# Altium footprint library WR-PHD_Socket Header_2.54mm.PcbLib: 187 footprints (part 7 of 12)
Each footprint in its own frame and in the unit in brackets; x right, y up, seen from the top. Pads: shape width x height; smd on the part's side, far side on the other; paste and mask are expansions set on the pad; w line width, h text height; cw(c..) or ccw(c..) is an arc to the next point about the centre after c.
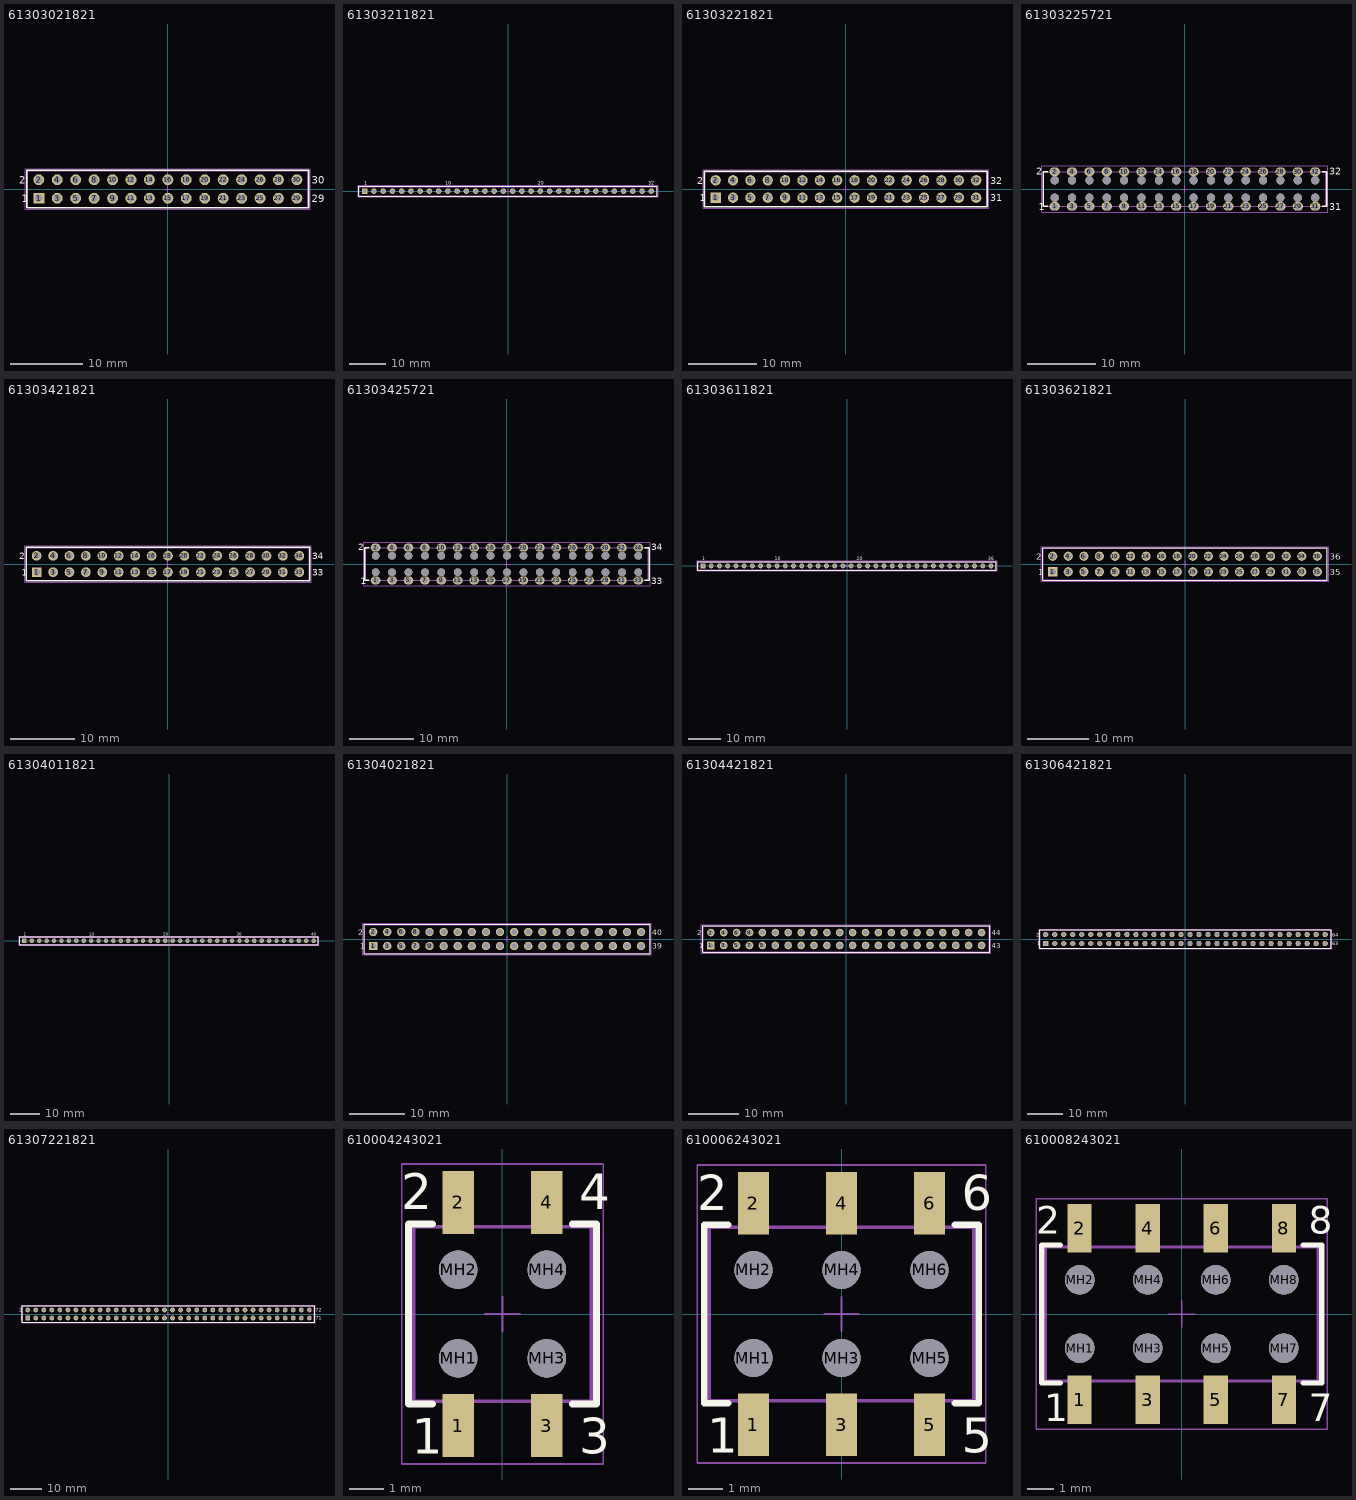
[diagram p6: the footprints below, top view; thin cyan lines are the x and y axes]

## 61303021821 [mm] "Socket Header, Pitch 2.54 mm, THT, Vertical, dual row, 30p"
height 8.4
pads (30):
  rect 1.5x1.5 hole 1.02: 1(-17.78,-1.27)
  round 1.5 hole 1.02: 2(-17.78,1.27) 3(-15.24,-1.27) 4(-15.24,1.27) 5(-12.7,-1.27) 6(-12.7,1.27) 7(-10.16,-1.27) 8(-10.16,1.27) 9(-7.62,-1.27) 10(-7.62,1.27) 11(-5.08,-1.27) 12(-5.08,1.27) 13(-2.54,-1.27) 14(-2.54,1.27) 15(0,-1.27) 16(0,1.27) 17(2.54,-1.27) 18(2.54,1.27) 19(5.08,-1.27) 20(5.08,1.27) 21(7.62,-1.27) 22(7.62,1.27) 23(10.16,-1.27) 24(10.16,1.27) 25(12.7,-1.27) 26(12.7,1.27) 27(15.24,-1.27) 28(15.24,1.27) 29(17.78,-1.27) 30(17.78,1.27)
Top Overlay:
  lines w0.2: -19.425,-2.615 -19.425,2.615 19.425,2.615 19.425,-2.615 -19.425,-2.615
  text "2" at -20.51,0.7 h1.02
  text "1" at -20.11,-1.8 h1.02
  text "30" at 19.81,0.7 h1.02
  text "29" at 19.81,-1.8 h1.02
Mechanical 13:
  lines w0.1: -19.3,-2.54 19.3,-2.54 19.3,2.54 -19.3,2.54 -19.3,-2.54
Mechanical 15:
  lines w0.05: -0.5,0 0.5,0 ; 0,-0.5 0,0.5 ; -19.625,-2.815 19.625,-2.815 19.625,2.815 -19.625,2.815 -19.625,-2.815
3D body "61303021821.stp": height 8.45, standoff -3.05, extent -19.3,-2.54 19.3,2.54

## 61303211821 [mm] "Socket Header, Pitch 2.54 mm, THT, Vertical, single row, 32p"
height 8.5
pads (32):
  rect 1.52x1.52 hole 1.02: 1(-39.37,0)
  round 1.52 hole 1.02: 2(-36.83,0) 3(-34.29,0) 4(-31.75,0) 5(-29.21,0) 6(-26.67,0) 7(-24.13,0) 8(-21.59,0) 9(-19.05,0) 10(-16.51,0) 11(-13.97,0) 12(-11.43,0) 13(-8.89,0) 14(-6.35,0) 15(-3.81,0) 16(-1.27,0) 17(1.27,0) 18(3.81,0) 19(6.35,0) 20(8.89,0) 21(11.43,0) 22(13.97,0) 23(16.51,0) 24(19.05,0) 25(21.59,0) 26(24.13,0) 27(26.67,0) 28(29.21,0) 29(31.75,0) 30(34.29,0) 31(36.83,0) 32(39.37,0)
Top Overlay:
  lines w0.2: -41.015,-1.35 41.015,-1.35 41.015,1.35 -41.015,1.35 -41.015,-1.35
  text "32" at 38.5,1.7 h1.02
  text "1" at -39.56,1.7 h1.02
  text "10" at -17.19,1.7 h1.02
  text "20" at 8.16,1.7 h1.02
Mechanical 13:
  lines w0.1: -40.89,-1.25 40.89,-1.25 40.89,1.25 -40.89,1.25 -40.89,-1.25
Mechanical 15:
  lines w0.05: -0.5,0 0.5,0 ; 0,-0.5 0,0.5 ; -41.215,-1.55 41.215,-1.55 41.215,1.55 -41.215,1.55 -41.215,-1.55
3D body "61303211821.stp": height 8.55, standoff -3.06, extent -40.89,-1.25 40.89,1.25

## 61303221821 [mm] "Socket Header, Pitch 2.54 mm, THT, Vertical, dual row, 32p"
height 8.4
pads (32):
  rect 1.5x1.5 hole 1.02: 1(-19.05,-1.27)
  round 1.5 hole 1.02: 2(-19.05,1.27) 3(-16.51,-1.27) 4(-16.51,1.27) 5(-13.97,-1.27) 6(-13.97,1.27) 7(-11.43,-1.27) 8(-11.43,1.27) 9(-8.89,-1.27) 10(-8.89,1.27) 11(-6.35,-1.27) 12(-6.35,1.27) 13(-3.81,-1.27) 14(-3.81,1.27) 15(-1.27,-1.27) 16(-1.27,1.27) 17(1.27,-1.27) 18(1.27,1.27) 19(3.81,-1.27) 20(3.81,1.27) 21(6.35,-1.27) 22(6.35,1.27) 23(8.89,-1.27) 24(8.89,1.27) 25(11.43,-1.27) 26(11.43,1.27) 27(13.97,-1.27) 28(13.97,1.27) 29(16.51,-1.27) 30(16.51,1.27) 31(19.05,-1.27) 32(19.05,1.27)
Top Overlay:
  lines w0.2: -20.695,-2.615 -20.695,2.615 20.695,2.615 20.695,-2.615 -20.695,-2.615
  text "31" at 21.08,-1.8 h1.02
  text "32" at 21.08,0.7 h1.02
  text "2" at -21.78,0.7 h1.02
  text "1" at -21.38,-1.8 h1.02
Mechanical 13:
  lines w0.1: -20.57,-2.54 20.57,-2.54 20.57,2.54 -20.57,2.54 -20.57,-2.54
Mechanical 15:
  lines w0.05: -0.5,0 0.5,0 ; 0,-0.5 0,0.5 ; -20.895,-2.815 20.895,-2.815 20.895,2.815 -20.895,2.815 -20.895,-2.815
3D body "61303221821.stp": height 8.45, standoff -3.05, extent -20.57,-2.54 20.57,2.54

## 61303225721 [mm] "Dual Socket Header Bottom Entry, pitch 2.54mm, 32p"
height 5
pads (64):
  oval 1.5x1.25 hole 1: 1(-19.05,-2.54) 2(-19.05,2.54) 3(-16.51,-2.54) 4(-16.51,2.54) 5(-13.97,-2.54) 6(-13.97,2.54) 7(-11.43,-2.54) 8(-11.43,2.54) 9(-8.89,-2.54) 10(-8.89,2.54) 11(-6.35,-2.54) 12(-6.35,2.54) 13(-3.81,-2.54) 14(-3.81,2.54) 15(-1.27,-2.54) 16(-1.27,2.54) 17(1.27,-2.54) 18(1.27,2.54) 19(3.81,-2.54) 20(3.81,2.54) 21(6.35,-2.54) 22(6.35,2.54) 23(8.89,-2.54) 24(8.89,2.54) 25(11.43,-2.54) 26(11.43,2.54) 27(13.97,-2.54) 28(13.97,2.54) 29(16.51,-2.54) 30(16.51,2.54) 31(19.05,-2.54) 32(19.05,2.54)
  round 1.2 hole 1.2 unplated: MH1(-19.05,-1.27) MH2(-19.05,1.27) MH3(-16.51,-1.27) MH4(-16.51,1.27) MH5(-13.97,-1.27) MH6(-13.97,1.27) MH7(-11.43,-1.27) MH8(-11.43,1.27) MH9(-8.89,-1.27) MH10(-8.89,1.27) MH11(-6.35,-1.27) MH12(-6.35,1.27) MH13(-3.81,-1.27) MH14(-3.81,1.27) MH15(-1.27,-1.27) MH16(-1.27,1.27) MH17(1.27,-1.27) MH18(1.27,1.27) MH19(3.81,-1.27) MH20(3.81,1.27) MH21(6.35,-1.27) MH22(6.35,1.27) MH23(8.89,-1.27) MH24(8.89,1.27) MH25(11.43,-1.27) MH26(11.43,1.27) MH27(13.97,-1.27) MH28(13.97,1.27) MH29(16.51,-1.27) MH30(16.51,1.27) MH31(19.05,-1.27) MH32(19.05,1.27)
Top Overlay:
  lines w0.2: -20.08,-2.54 -20.72,-2.54 -20.72,2.54 -20.08,2.54 ; 20.08,-2.54 20.72,-2.54 20.72,2.54 20.08,2.54
  text "1" at -21.38,-3.1 h1.02
  text "2" at -21.78,2.1 h1.02
  text "31" at 21.08,-3.1 h1.02
  text "32" at 21.08,2.1 h1.02
Mechanical 13:
  lines w0.1: -20.62,-2.54 -20.62,2.54 20.62,2.54 20.62,-2.54 -20.62,-2.54
Mechanical 15:
  lines w0.05: -0.5,0 0.5,0 ; 0,-0.5 0,0.5 ; -20.92,-3.365 20.92,-3.365 20.92,3.365 -20.92,3.365 -20.92,-3.365
3D body "61303225721.stp": height 5.05, standoff -3.05, extent -20.62,-2.665 20.62,2.665

## 61303421821 [mm] "Socket Header, Pitch 2.54 mm, THT, Vertical, dual row, 34p"
height 8.4
pads (34):
  rect 1.5x1.5 hole 1.02: 1(-20.32,-1.27)
  round 1.5 hole 1.02: 2(-20.32,1.27) 3(-17.78,-1.27) 4(-17.78,1.27) 5(-15.24,-1.27) 6(-15.24,1.27) 7(-12.7,-1.27) 8(-12.7,1.27) 9(-10.16,-1.27) 10(-10.16,1.27) 11(-7.62,-1.27) 12(-7.62,1.27) 13(-5.08,-1.27) 14(-5.08,1.27) 15(-2.54,-1.27) 16(-2.54,1.27) 17(0,-1.27) 18(0,1.27) 19(2.54,-1.27) 20(2.54,1.27) 21(5.08,-1.27) 22(5.08,1.27) 23(7.62,-1.27) 24(7.62,1.27) 25(10.16,-1.27) 26(10.16,1.27) 27(12.7,-1.27) 28(12.7,1.27) 29(15.24,-1.27) 30(15.24,1.27) 31(17.78,-1.27) 32(17.78,1.27) 33(20.32,-1.27) 34(20.32,1.27)
Top Overlay:
  lines w0.2: -21.965,-2.615 21.965,-2.615 21.965,2.615 -21.965,2.615 -21.965,-2.615
  text "1" at -22.65,-1.8 h1.02
  text "2" at -23.05,0.7 h1.02
  text "34" at 22.35,0.7 h1.02
  text "33" at 22.35,-1.8 h1.02
Mechanical 13:
  lines w0.1: -21.84,-2.54 -21.84,2.54 21.84,2.54 21.84,-2.54 -21.84,-2.54
Mechanical 15:
  lines w0.05: -0.5,0 0.5,0 ; 0,-0.5 0,0.5 ; -22.165,-2.815 -22.165,2.815 22.165,2.815 22.165,-2.815 -22.165,-2.815
3D body "61303421821.stp": height 8.45, standoff -3.05, extent -21.84,-2.54 21.84,2.54

## 61303425721 [mm] "Dual Socket Header Bottom Entry, pitch 2.54mm, 34p"
height 5
pads (68):
  oval 1.5x1.25 hole 1: 1(-20.32,-2.54) 2(-20.32,2.54) 3(-17.78,-2.54) 4(-17.78,2.54) 5(-15.24,-2.54) 6(-15.24,2.54) 7(-12.7,-2.54) 8(-12.7,2.54) 9(-10.16,-2.54) 10(-10.16,2.54) 11(-7.62,-2.54) 12(-7.62,2.54) 13(-5.08,-2.54) 14(-5.08,2.54) 15(-2.54,-2.54) 16(-2.54,2.54) 17(0,-2.54) 18(0,2.54) 19(2.54,-2.54) 20(2.54,2.54) 21(5.08,-2.54) 22(5.08,2.54) 23(7.62,-2.54) 24(7.62,2.54) 25(10.16,-2.54) 26(10.16,2.54) 27(12.7,-2.54) 28(12.7,2.54) 29(15.24,-2.54) 30(15.24,2.54) 31(17.78,-2.54) 32(17.78,2.54) 33(20.32,-2.54) 34(20.32,2.54)
  round 1.2 hole 1.2 unplated: MH1(-20.32,-1.27) MH2(-20.32,1.27) MH3(-17.78,-1.27) MH4(-17.78,1.27) MH5(-15.24,-1.27) MH6(-15.24,1.27) MH7(-12.7,-1.27) MH8(-12.7,1.27) MH9(-10.16,-1.27) MH10(-10.16,1.27) MH11(-7.62,-1.27) MH12(-7.62,1.27) MH13(-5.08,-1.27) MH14(-5.08,1.27) MH15(-2.54,-1.27) MH16(-2.54,1.27) MH17(0,-1.27) MH18(0,1.27) MH19(2.54,-1.27) MH20(2.54,1.27) MH21(5.08,-1.27) MH22(5.08,1.27) MH23(7.62,-1.27) MH24(7.62,1.27) MH25(10.16,-1.27) MH26(10.16,1.27) MH27(12.7,-1.27) MH28(12.7,1.27) MH29(15.24,-1.27) MH30(15.24,1.27) MH31(17.78,-1.27) MH32(17.78,1.27) MH33(20.32,-1.27) MH34(20.32,1.27)
Top Overlay:
  lines w0.2: -21.35,-2.54 -21.99,-2.54 -21.99,2.54 -21.35,2.54 ; 21.35,-2.54 21.99,-2.54 21.99,2.54 21.35,2.54
  text "34" at 22.35,2.1 h1.02
  text "33" at 22.35,-3.1 h1.02
  text "2" at -23.05,2.1 h1.02
  text "1" at -22.65,-3.1 h1.02
Mechanical 13:
  lines w0.1: -21.89,-2.54 21.89,-2.54 21.89,2.54 -21.89,2.54 -21.89,-2.54
Mechanical 15:
  lines w0.05: -0.5,0 0.5,0 ; 0,-0.5 0,0.5 ; -22.19,-3.365 -22.19,3.365 22.19,3.365 22.19,-3.365 -22.19,-3.365
3D body "61303425721.stp": height 5.05, standoff -3.05, extent -21.89,-2.665 21.89,2.665

## 61303611821 [mm] "Socket Header, Pitch 2.54 mm, THT, Vertical, single row, 36p"
height 8.5
pads (36):
  rect 1.52x1.52 hole 1.02: 1(-44.45,0)
  round 1.52 hole 1.02: 2(-41.91,0) 3(-39.37,0) 4(-36.83,0) 5(-34.29,0) 6(-31.75,0) 7(-29.21,0) 8(-26.67,0) 9(-24.13,0) 10(-21.59,0) 11(-19.05,0) 12(-16.51,0) 13(-13.97,0) 14(-11.43,0) 15(-8.89,0) 16(-6.35,0) 17(-3.81,0) 18(-1.27,0) 19(1.27,0) 20(3.81,0) 21(6.35,0) 22(8.89,0) 23(11.43,0) 24(13.97,0) 25(16.51,0) 26(19.05,0) 27(21.59,0) 28(24.13,0) 29(26.67,0) 30(29.21,0) 31(31.75,0) 32(34.29,0) 33(36.83,0) 34(39.37,0) 35(41.91,0) 36(44.45,0)
Top Overlay:
  lines w0.2: -46.095,-1.35 -46.095,1.35 46.095,1.35 46.095,-1.35 -46.095,-1.35
  text "20" at 3.08,1.7 h1.02
  text "10" at -22.27,1.7 h1.02
  text "1" at -44.64,1.7 h1.02
  text "36" at 43.58,1.7 h1.02
Mechanical 13:
  lines w0.1: -45.97,-1.25 -45.97,1.25 45.97,1.25 45.97,-1.25 -45.97,-1.25
Mechanical 15:
  lines w0.05: -0.5,0 0.5,0 ; 0,-0.5 0,0.5 ; -46.295,-1.55 -46.295,1.55 46.295,1.55 46.295,-1.55 -46.295,-1.55
3D body "61303611821.stp": height 8.55, standoff -3.06, extent -45.97,-1.25 45.97,1.25

## 61303621821 [mm] "Socket Header, Pitch 2.54 mm, THT, Vertical, dual row, 36p"
height 8.4
pads (36):
  rect 1.5x1.5 hole 1.02: 1(-21.59,-1.27)
  round 1.5 hole 1.02: 2(-21.59,1.27) 3(-19.05,-1.27) 4(-19.05,1.27) 5(-16.51,-1.27) 6(-16.51,1.27) 7(-13.97,-1.27) 8(-13.97,1.27) 9(-11.43,-1.27) 10(-11.43,1.27) 11(-8.89,-1.27) 12(-8.89,1.27) 13(-6.35,-1.27) 14(-6.35,1.27) 15(-3.81,-1.27) 16(-3.81,1.27) 17(-1.27,-1.27) 18(-1.27,1.27) 19(1.27,-1.27) 20(1.27,1.27) 21(3.81,-1.27) 22(3.81,1.27) 23(6.35,-1.27) 24(6.35,1.27) 25(8.89,-1.27) 26(8.89,1.27) 27(11.43,-1.27) 28(11.43,1.27) 29(13.97,-1.27) 30(13.97,1.27) 31(16.51,-1.27) 32(16.51,1.27) 33(19.05,-1.27) 34(19.05,1.27) 35(21.59,-1.27) 36(21.59,1.27)
Top Overlay:
  lines w0.2: -23.235,-2.615 23.235,-2.615 23.235,2.615 -23.235,2.615 -23.235,-2.615
  text "35" at 23.62,-1.8 h1.02
  text "36" at 23.62,0.7 h1.02
  text "1" at -23.92,-1.8 h1.02
  text "2" at -24.32,0.7 h1.02
Mechanical 13:
  lines w0.1: -23.11,-2.54 -23.11,2.54 23.11,2.54 23.11,-2.54 -23.11,-2.54
Mechanical 15:
  lines w0.05: -0.5,0 0.5,0 ; 0,-0.5 0,0.5 ; -23.435,-2.815 -23.435,2.815 23.435,2.815 23.435,-2.815 -23.435,-2.815
3D body "61303621821.stp": height 8.45, standoff -3.05, extent -23.11,-2.54 23.11,2.54

## 61304011821 [mm] "Socket Header, Pitch 2.54 mm, THT, Vertical, single row, 40p"
height 8.5
pads (40):
  rect 1.52x1.52 hole 1.02: 1(-49.53,0)
  round 1.52 hole 1.02: 2(-46.99,0) 3(-44.45,0) 4(-41.91,0) 5(-39.37,0) 6(-36.83,0) 7(-34.29,0) 8(-31.75,0) 9(-29.21,0) 10(-26.67,0) 11(-24.13,0) 12(-21.59,0) 13(-19.05,0) 14(-16.51,0) 15(-13.97,0) 16(-11.43,0) 17(-8.89,0) 18(-6.35,0) 19(-3.81,0) 20(-1.27,0) 21(1.27,0) 22(3.81,0) 23(6.35,0) 24(8.89,0) 25(11.43,0) 26(13.97,0) 27(16.51,0) 28(19.05,0) 29(21.59,0) 30(24.13,0) 31(26.67,0) 32(29.21,0) 33(31.75,0) 34(34.29,0) 35(36.83,0) 36(39.37,0) 37(41.91,0) 38(44.45,0) 39(46.99,0) 40(49.53,0)
Top Overlay:
  lines w0.2: -51.175,-1.35 51.175,-1.35 51.175,1.35 -51.175,1.35 -51.175,-1.35
  text "1" at -49.72,1.7 h1.02
  text "10" at -27.35,1.7 h1.02
  text "20" at -2,1.7 h1.02
  text "40" at 48.66,1.7 h1.02
  text "30" at 23.26,1.7 h1.02
Mechanical 13:
  lines w0.1: -51.05,-1.25 51.05,-1.25 51.05,1.25 -51.05,1.25 -51.05,-1.25
Mechanical 15:
  lines w0.05: -0.5,0 0.5,0 ; 0,-0.5 0,0.5 ; -51.375,-1.55 51.375,-1.55 51.375,1.55 -51.375,1.55 -51.375,-1.55
3D body "61304011821.stp": height 8.55, standoff -3.05, extent -51.05,-1.25 51.05,1.25

## 61304021821 [mm] "Socket Header, Pitch 2.54 mm, THT, Vertical, dual row, 40p"
height 8.4
pads (40):
  rect 1.5x1.5 hole 1.02: 1(-24.13,-1.27)
  round 1.5 hole 1.02: 2(-24.13,1.27) 3(-21.59,-1.27) 4(-21.59,1.27) 5(-19.05,-1.27) 6(-19.05,1.27) 7(-16.51,-1.27) 8(-16.51,1.27) 9(-13.97,-1.27) 10(-13.97,1.27) 11(-11.43,-1.27) 12(-11.43,1.27) 13(-8.89,-1.27) 14(-8.89,1.27) 15(-6.35,-1.27) 16(-6.35,1.27) 17(-3.81,-1.27) 18(-3.81,1.27) 19(-1.27,-1.27) 20(-1.27,1.27) 21(1.27,-1.27) 22(1.27,1.27) 23(3.81,-1.27) 24(3.81,1.27) 25(6.35,-1.27) 26(6.35,1.27) 27(8.89,-1.27) 28(8.89,1.27) 29(11.43,-1.27) 30(11.43,1.27) 31(13.97,-1.27) 32(13.97,1.27) 33(16.51,-1.27) 34(16.51,1.27) 35(19.05,-1.27) 36(19.05,1.27) 37(21.59,-1.27) 38(21.59,1.27) 39(24.13,-1.27) 40(24.13,1.27)
Top Overlay:
  lines w0.2: -25.775,-2.615 25.775,-2.615 25.775,2.615 -25.775,2.615 -25.775,-2.615
  text "1" at -26.46,-1.8 h1.02
  text "2" at -26.86,0.7 h1.02
  text "40" at 26.16,0.7 h1.02
  text "39" at 26.16,-1.8 h1.02
Mechanical 13:
  lines w0.1: -25.65,-2.54 -25.65,2.54 25.65,2.54 25.65,-2.54 -25.65,-2.54
Mechanical 15:
  lines w0.05: -0.5,0 0.5,0 ; 0,-0.5 0,0.5 ; -25.975,-2.815 -25.975,2.815 25.975,2.815 25.975,-2.815 -25.975,-2.815
3D body "61304021821.stp": height 8.45, standoff -3.05, extent -25.65,-2.54 25.65,2.54

## 61304421821 [mm] "Socket Header, Pitch 2.54 mm, THT, Vertical, dual row, 44p"
height 8.4
pads (44):
  rect 1.5x1.5 hole 1.02: 1(-26.67,-1.27)
  round 1.5 hole 1.02: 2(-26.67,1.27) 3(-24.13,-1.27) 4(-24.13,1.27) 5(-21.59,-1.27) 6(-21.59,1.27) 7(-19.05,-1.27) 8(-19.05,1.27) 9(-16.51,-1.27) 10(-16.51,1.27) 11(-13.97,-1.27) 12(-13.97,1.27) 13(-11.43,-1.27) 14(-11.43,1.27) 15(-8.89,-1.27) 16(-8.89,1.27) 17(-6.35,-1.27) 18(-6.35,1.27) 19(-3.81,-1.27) 20(-3.81,1.27) 21(-1.27,-1.27) 22(-1.27,1.27) 23(1.27,-1.27) 24(1.27,1.27) 25(3.81,-1.27) 26(3.81,1.27) 27(6.35,-1.27) 28(6.35,1.27) 29(8.89,-1.27) 30(8.89,1.27) 31(11.43,-1.27) 32(11.43,1.27) 33(13.97,-1.27) 34(13.97,1.27) 35(16.51,-1.27) 36(16.51,1.27) 37(19.05,-1.27) 38(19.05,1.27) 39(21.59,-1.27) 40(21.59,1.27) 41(24.13,-1.27) 42(24.13,1.27) 43(26.67,-1.27) 44(26.67,1.27)
Top Overlay:
  lines w0.2: -28.315,-2.615 28.315,-2.615 28.315,2.615 -28.315,2.615 -28.315,-2.615
  text "1" at -29,-1.8 h1.02
  text "2" at -29.4,0.7 h1.02
  text "44" at 28.7,0.7 h1.02
  text "43" at 28.7,-1.8 h1.02
Mechanical 13:
  lines w0.1: -28.19,-2.54 -28.19,2.54 28.19,2.54 28.19,-2.54 -28.19,-2.54
Mechanical 15:
  lines w0.05: -0.5,0 0.5,0 ; 0,-0.5 0,0.5 ; -28.515,-2.815 -28.515,2.815 28.515,2.815 28.515,-2.815 -28.515,-2.815
3D body "61304421821.stp": height 8.45, standoff -3.05, extent -28.19,-2.54 28.19,2.54

## 61306421821 [mm] "Socket Header, Pitch 2.54 mm, THT, Vertical, dual row, 64p"
height 8.4
pads (64):
  rect 1.5x1.5 hole 1.02: 1(-39.37,-1.27)
  round 1.5 hole 1.02: 2(-39.37,1.27) 3(-36.83,-1.27) 4(-36.83,1.27) 5(-34.29,-1.27) 6(-34.29,1.27) 7(-31.75,-1.27) 8(-31.75,1.27) 9(-29.21,-1.27) 10(-29.21,1.27) 11(-26.67,-1.27) 12(-26.67,1.27) 13(-24.13,-1.27) 14(-24.13,1.27) 15(-21.59,-1.27) 16(-21.59,1.27) 17(-19.05,-1.27) 18(-19.05,1.27) 19(-16.51,-1.27) 20(-16.51,1.27) 21(-13.97,-1.27) 22(-13.97,1.27) 23(-11.43,-1.27) 24(-11.43,1.27) 25(-8.89,-1.27) 26(-8.89,1.27) 27(-6.35,-1.27) 28(-6.35,1.27) 29(-3.81,-1.27) 30(-3.81,1.27) 31(-1.27,-1.27) 32(-1.27,1.27) 33(1.27,-1.27) 34(1.27,1.27) 35(3.81,-1.27) 36(3.81,1.27) 37(6.35,-1.27) 38(6.35,1.27) 39(8.89,-1.27) 40(8.89,1.27) 41(11.43,-1.27) 42(11.43,1.27) 43(13.97,-1.27) 44(13.97,1.27) 45(16.51,-1.27) 46(16.51,1.27) 47(19.05,-1.27) 48(19.05,1.27) 49(21.59,-1.27) 50(21.59,1.27) 51(24.13,-1.27) 52(24.13,1.27) 53(26.67,-1.27) 54(26.67,1.27) 55(29.21,-1.27) 56(29.21,1.27) 57(31.75,-1.27) 58(31.75,1.27) 59(34.29,-1.27) 60(34.29,1.27) 61(36.83,-1.27) 62(36.83,1.27) 63(39.37,-1.27) 64(39.37,1.27)
Top Overlay:
  lines w0.2: -41.015,-2.615 41.015,-2.615 41.015,2.615 -41.015,2.615 -41.015,-2.615
  text "1" at -41.7,-1.8 h1.02
  text "2" at -42.1,0.7 h1.02
  text "64" at 41.4,0.7 h1.02
  text "63" at 41.4,-1.8 h1.02
Mechanical 13:
  lines w0.1: -40.89,-2.54 -40.89,2.54 40.89,2.54 40.89,-2.54 -40.89,-2.54
Mechanical 15:
  lines w0.05: -0.5,0 0.5,0 ; 0,-0.5 0,0.5 ; -41.215,-2.815 -41.215,2.815 41.215,2.815 41.215,-2.815 -41.215,-2.815
3D body "61306421821.stp": height 8.45, standoff -3.05, extent -40.89,-2.54 40.89,2.54

## 61307221821 [mm] "Socket Header, Pitch 2.54 mm, THT, Vertical, dual row, 72p"
height 8.4
pads (72):
  rect 1.5x1.5 hole 1.02: 1(-44.45,-1.27)
  round 1.5 hole 1.02: 2(-44.45,1.27) 3(-41.91,-1.27) 4(-41.91,1.27) 5(-39.37,-1.27) 6(-39.37,1.27) 7(-36.83,-1.27) 8(-36.83,1.27) 9(-34.29,-1.27) 10(-34.29,1.27) 11(-31.75,-1.27) 12(-31.75,1.27) 13(-29.21,-1.27) 14(-29.21,1.27) 15(-26.67,-1.27) 16(-26.67,1.27) 17(-24.13,-1.27) 18(-24.13,1.27) 19(-21.59,-1.27) 20(-21.59,1.27) 21(-19.05,-1.27) 22(-19.05,1.27) 23(-16.51,-1.27) 24(-16.51,1.27) 25(-13.97,-1.27) 26(-13.97,1.27) 27(-11.43,-1.27) 28(-11.43,1.27) 29(-8.89,-1.27) 30(-8.89,1.27) 31(-6.35,-1.27) 32(-6.35,1.27) 33(-3.81,-1.27) 34(-3.81,1.27) 35(-1.27,-1.27) 36(-1.27,1.27) 37(1.27,-1.27) 38(1.27,1.27) 39(3.81,-1.27) 40(3.81,1.27) 41(6.35,-1.27) 42(6.35,1.27) 43(8.89,-1.27) 44(8.89,1.27) 45(11.43,-1.27) 46(11.43,1.27) 47(13.97,-1.27) 48(13.97,1.27) 49(16.51,-1.27) 50(16.51,1.27) 51(19.05,-1.27) 52(19.05,1.27) 53(21.59,-1.27) 54(21.59,1.27) 55(24.13,-1.27) 56(24.13,1.27) 57(26.67,-1.27) 58(26.67,1.27) 59(29.21,-1.27) 60(29.21,1.27) 61(31.75,-1.27) 62(31.75,1.27) 63(34.29,-1.27) 64(34.29,1.27) 65(36.83,-1.27) 66(36.83,1.27) 67(39.37,-1.27) 68(39.37,1.27) 69(41.91,-1.27) 70(41.91,1.27) 71(44.45,-1.27) 72(44.45,1.27)
Top Overlay:
  lines w0.2: -46.095,-2.615 46.095,-2.615 46.095,2.615 -46.095,2.615 -46.095,-2.615
  text "1" at -46.78,-1.8 h1.02
  text "2" at -47.18,0.7 h1.02
  text "72" at 46.48,0.7 h1.02
  text "71" at 46.48,-1.8 h1.02
Mechanical 13:
  lines w0.1: -45.97,-2.54 -45.97,2.54 45.97,2.54 45.97,-2.54 -45.97,-2.54
Mechanical 15:
  lines w0.05: -0.5,0 0.5,0 ; 0,-0.5 0,0.5 ; -46.295,-2.815 -46.295,2.815 46.295,2.815 46.295,-2.815 -46.295,-2.815
3D body "61307221821.stp": height 8.45, standoff -3.05, extent -45.97,-2.54 45.97,2.54

## 610004243021 [mm] "Socket Header, Pitch 2.54 mm, SMT, Vertical, dual row, 4p"
height 3.7
pads (8):
  rect 0.9x1.8 smd: 1(-1.27,-3.2) 2(-1.27,3.2) 3(1.27,-3.2) 4(1.27,3.2)
  round 1.1 hole 1.1 unplated: MH1(-1.27,-1.27) MH2(-1.27,1.27) MH3(1.27,-1.27) MH4(1.27,1.27)
Top Overlay:
  lines w0.2: -2,-2.575 -2.69,-2.575 -2.69,2.575 -2,2.575 ; 2,-2.575 2.69,-2.575 2.69,2.575 2,2.575
  text "1" at -2.6,-4 h1.02
  text "3" at 2.2,-4 h1.02
  text "4" at 2.2,3 h1.02
  text "2" at -2.9,3 h1.02
Mechanical 13:
  lines w0.1: -1.52,-2.5 -1.52,-3.6 -1.02,-3.6 -1.02,-2.5 ; -1.52,2.5 -1.52,3.6 -1.02,3.6 -1.02,2.5 ; 1.02,-2.5 1.02,-3.6 1.52,-3.6 1.52,-2.5 ; 1.02,2.5 1.02,3.6 1.52,3.6 1.52,2.5 ; -2.54,-2.5 2.54,-2.5 2.54,2.5 -2.54,2.5 -2.54,-2.5
Mechanical 15:
  lines w0.05: -0.5,0 0.5,0 ; 0,-0.5 0,0.5 ; -2.89,-4.3 2.89,-4.3 2.89,4.3 -2.89,4.3 -2.89,-4.3
3D body "610004243021.stp": height 3.7, standoff 0, extent -2.54,-3.603 2.54,3.603

## 610006243021 [mm] "Socket Header, Pitch 2.54 mm, SMT, Vertical, dual row, 6p"
height 3.7
pads (12):
  rect 0.9x1.8 smd: 1(-2.54,-3.2) 2(-2.54,3.2) 3(0,-3.2) 4(0,3.2) 5(2.54,-3.2) 6(2.54,3.2)
  round 1.1 hole 1.1 unplated: MH1(-2.54,-1.27) MH2(-2.54,1.27) MH3(0,-1.27) MH4(0,1.27) MH5(2.54,-1.27) MH6(2.54,1.27)
Top Overlay:
  lines w0.2: -3.27,-2.575 -3.96,-2.575 -3.96,2.575 -3.27,2.575 ; 3.27,-2.575 3.96,-2.575 3.96,2.575 3.27,2.575
  text "2" at -4.17,3 h1.02
  text "1" at -3.87,-4 h1.02
  text "6" at 3.47,3 h1.02
  text "5" at 3.47,-4 h1.02
Mechanical 13:
  lines w0.1: -2.79,-2.5 -2.79,-3.6 -2.29,-3.6 -2.29,-2.5 ; -2.79,2.5 -2.79,3.6 -2.29,3.6 -2.29,2.5 ; -0.25,-2.5 -0.25,-3.6 0.25,-3.6 0.25,-2.5 ; -0.25,2.5 -0.25,3.6 0.25,3.6 0.25,2.5 ; 2.29,-2.5 2.29,-3.6 2.79,-3.6 2.79,-2.5 ; 2.29,2.5 2.29,3.6 2.79,3.6 2.79,2.5 ; -3.81,-2.5 -3.81,2.5 3.81,2.5 3.81,-2.5 -3.81,-2.5
Mechanical 15:
  lines w0.05: -0.5,0 0.5,0 ; 0,-0.5 0,0.5 ; -4.16,-4.3 -4.16,4.3 4.16,4.3 4.16,-4.3 -4.16,-4.3
3D body "610006243021.stp": height 3.7, standoff 0, extent -3.81,-3.603 3.81,3.603

## 610008243021 [mm] "Socket Header, Pitch 2.54 mm, SMT, Vertical, dual row, 8p"
height 3.7
pads (16):
  rect 0.9x1.8 smd: 1(-3.81,-3.2) 2(-3.81,3.2) 3(-1.27,-3.2) 4(-1.27,3.2) 5(1.27,-3.2) 6(1.27,3.2) 7(3.81,-3.2) 8(3.81,3.2)
  round 1.1 hole 1.1 unplated: MH1(-3.81,-1.27) MH2(-3.81,1.27) MH3(-1.27,-1.27) MH4(-1.27,1.27) MH5(1.27,-1.27) MH6(1.27,1.27) MH7(3.81,-1.27) MH8(3.81,1.27)
Top Overlay:
  lines w0.2: -4.54,-2.575 -5.23,-2.575 -5.23,2.575 -4.54,2.575 ; 4.54,-2.575 5.23,-2.575 5.23,2.575 4.54,2.575
  text "7" at 4.74,-4 h1.02
  text "8" at 4.74,3 h1.02
  text "2" at -5.44,3 h1.02
  text "1" at -5.14,-4 h1.02
Mechanical 13:
  lines w0.1: -4.06,-2.5 -4.06,-3.6 -3.56,-3.6 -3.56,-2.5 ; -4.06,2.5 -4.06,3.6 -3.56,3.6 -3.56,2.5 ; -1.52,-2.5 -1.52,-3.6 -1.02,-3.6 -1.02,-2.5 ; -1.52,2.5 -1.52,3.6 -1.02,3.6 -1.02,2.5 ; 1.02,-2.5 1.02,-3.6 1.52,-3.6 1.52,-2.5 ; 1.02,2.5 1.02,3.6 1.52,3.6 1.52,2.5 ; 3.56,-2.5 3.56,-3.6 4.06,-3.6 4.06,-2.5 ; 3.56,2.5 3.56,3.6 4.06,3.6 4.06,2.5 ; -5.08,-2.5 -5.08,2.5 5.08,2.5 5.08,-2.5 -5.08,-2.5
Mechanical 15:
  lines w0.05: -0.5,0 0.5,0 ; 0,-0.5 0,0.5 ; -5.43,-4.3 -5.43,4.3 5.43,4.3 5.43,-4.3 -5.43,-4.3
3D body "610008243021.stp": height 3.7, standoff 0, extent -5.08,-3.603 5.08,3.603